# Altium footprint library JST_SM02B-GHS-TB(LF)(SN).PcbLib: 1 footprints
Each footprint in its own frame and in the unit in brackets; x right, y up, seen from the top. Pads: shape width x height; smd on the part's side, far side on the other; paste and mask are expansions set on the pad; w line width, h text height; cw(c..) or ccw(c..) is an arc to the next point about the centre after c.
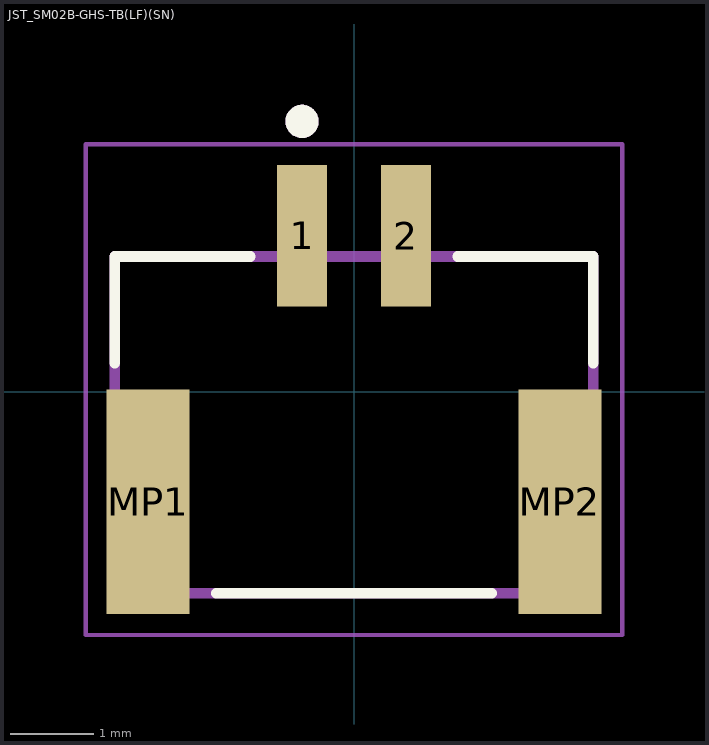
[diagram p0: the footprint, top view; thin cyan lines are the x and y axes]

## JST_SM02B-GHS-TB(LF)(SN) [mm]
pads (4):
  rect 0.6x1.7 smd paste+0 mask+0.102: 1(-0.625,1.875) 2(0.625,1.875)
  rect 1x2.7 smd paste+0 mask+0.102: MP1(-2.475,-1.325) MP2(2.475,-1.325)
Top Overlay:
  circle w0.2: c-0.625,3.25 r0.1
  lines w0.127: -2.875,0.345 -2.875,1.625 -1.245,1.625 ; -1.655,-2.425 1.655,-2.425 ; 1.245,1.625 2.875,1.625 2.875,0.345
Assembly Top:
  circle w0.2: c-0.625,3.25 r0.1
  lines w0.127: -2.875,-2.425 -2.875,1.625 2.875,1.625 2.875,-2.425 -2.875,-2.425
Courtyard Top:
  lines w0.05: -3.225,-2.925 -3.225,2.975 3.225,2.975 3.225,-2.925 -3.225,-2.925
3D body "step_temp.STEP": height 4.25, standoff 0, extent -2.875,-2.048 2.875,2.802